# Altium schematic symbol library Schlib1.SchLib: 2 symbols
Pins are listed as number, name and electrical type; pins without a type are passive.

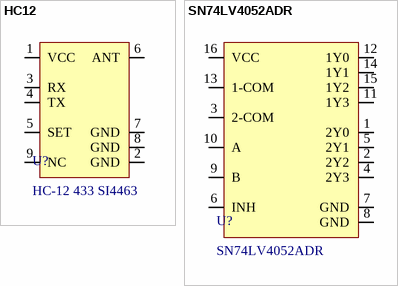
[diagram p0: symbols HC12 to SN74LV4052ADR]

## HC12
designator U?, comment HC-12 433 SI4463
Manufacturer: *; Manufacturer Part Number: *; Parameter 3: *; Item Type: *; Package: *
footprint HC-12 Module
pins: 1 VCC, 2 GND, 3 RX, 4 TX, 5 SET, 6 ANT, 7 GND, 8 GND, 9 NC

## SN74LV4052ADR
designator U?
Analog Multiplexer Dual 4: 1 16-Pin SOIC T/R / IC MULTIPLEXER DUAL 4X1 16SOIC; Manufacturer: Texas Instruments; Drain to Source Resistance: 100R; Item Type: UART MUX; Supplier: Mouser; Supplier Part Number: 595-SN74LV4052ADR; Manufacturer Part Number: SN74LV4052ADR; RoHS: Yes; Category: Decoders and Multiplexers; Stock: 6120; Pricing: 1=0.39, 10=0.319, 50=0.319, 100=0.237, 1000=0.163, 10000=0.131 (USD); Length: 9.9mm; Width: 3.91mm; Height: 1.75mm; Thickness: 1.58mm; ComponentLink1URL: https://datasheet.ciiva.com/15127/getdatasheetpartid-296403-15127637.pdf?src-supplier=Verical; ComponentLink1Description: https://datasheet.ciiva.com/15127/getdatasheetpartid-296403-15127637.pdf?src-supplier=Verical; ComponentLink2URL: https://datasheet.ciiva.com/1669/sn74lv4052a-1669728.pdf?src-supplier=Digikey; ComponentLink2Description: https://datasheet.ciiva.com/1669/sn74lv4052a-1669728.pdf?src-supplier=Digikey; ComponentLink3URL: https://datasheet.ciiva.com/46435/1845014-46435855.pdf?src-supplier=Element14; ComponentLink3Description: https://datasheet.ciiva.com/46435/1845014-46435855.pdf?src-supplier=Element14; ComponentLink4URL: https://datasheet.ciiva.com/14306/sn74lv4052a-14306682.pdf?src-supplier=Avnet; ComponentLink4Description: https://datasheet.ciiva.com/14306/sn74lv4052a-14306682.pdf?src-supplier=Avnet; ComponentLink5URL: https://datasheet.ciiva.com/1669/sn74lv4052a-1669727.pdf?src-supplier=Digikey; ComponentLink5Description: https://datasheet.ciiva.com/1669/sn74lv4052a-1669727.pdf?src-supplier=Digikey; ComponentLink6URL: https://datasheet.ciiva.com/1669/sn74lv4052a-1669729.pdf?src-supplier=Digikey; ComponentLink6Description: https://datasheet.ciiva.com/1669/sn74lv4052a-1669729.pdf?src-supplier=Digikey; ComponentLink7URL: https://datasheet.ciiva.com/48711/001048022-da-01-en-ic-mp-sn74lv40-sn74lv4052adr-soic-16-tid-48711974.pdf?src-supplier=Conrad; ComponentLink7Description: https://datasheet.ciiva.com/48711/001048022-da-01-en-ic-mp-sn74lv40-sn74lv4052adr-soic-16-tid-48711974.pdf?src-supplier=Conrad; LCSC Part Number: C273641; ComponentLink8Description: LCSC Link; ComponentLink8URL: https://www.lcsc.com/product-detail/Analog-Switches-Multiplexers_Texas-Instruments-SN74LV4052ADR_C273641.html
footprint SOIC127P600X175-16N
pins: 1 2Y0, 2 2Y2, 3 2-COM, 4 2Y3, 5 2Y1, 6 INH, 7 GND, 8 GND, 9 B, 10 A, 11 1Y3, 12 1Y0, 13 1-COM, 14 1Y1, 15 1Y2, 16 VCC